# Altium schematic symbol library Schlib2.SchLib: 4 symbols
Pins are listed as number, name and electrical type; pins without a type are passive.

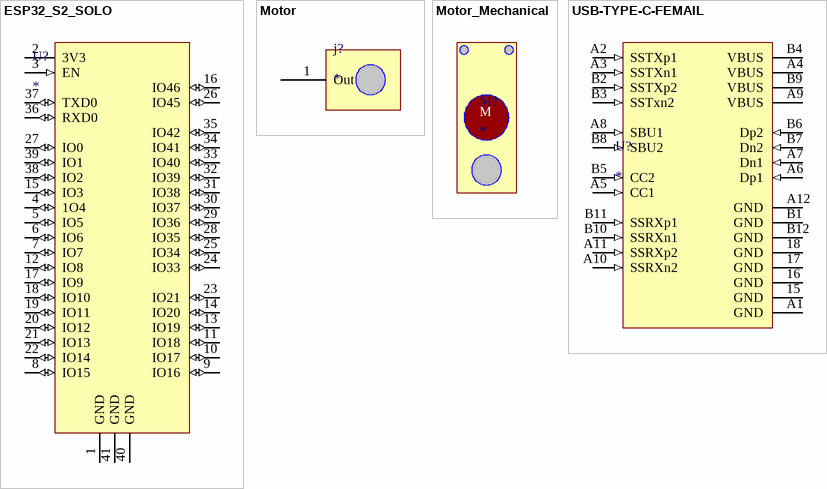
[diagram p0: symbols ESP32_S2_SOLO to USB-TYPE-C-FEMAIL]

## ESP32_S2_SOLO
designator U?
footprint ESP32_S2_SOLO
pins: 1 GND (power), 2 3V3 (power), 3 EN (in), 4 1O4 (io), 5 IO5 (io), 6 IO6 (io), 7 IO7 (io), 8 IO15 (io), 9 IO16 (io), 10 IO17 (io), 11 IO18 (io), 12 IO8 (io), 13 IO19 (io), 14 IO20 (io), 15 IO3 (io), 16 IO46 (io), 17 IO9 (io), 18 IO10 (io), 19 IO11 (io), 20 IO12 (io), 21 IO13 (io), 22 IO14 (io), 23 IO21 (io), 24 IO33 (io), 25 IO34 (io), 26 IO45 (io), 27 IO0 (io), 28 IO35 (io), 29 IO36 (io), 30 IO37 (io), 31 IO38 (io), 32 IO39 (io), 33 IO40 (io), 34 IO41 (io), 35 IO42 (io), 36 RXD0 (io), 37 TXD0 (io), 38 IO2 (io), 39 IO1 (io), 40 GND (power), 41 GND (power)

## Motor
designator j?
footprint Motor_pin
pins: 1 Out

## Motor_Mechanical
designator M?
footprint Motor_mechanical
text: M

## USB-TYPE-C-FEMAIL
designator U?
footprint C5156605 (USB-C-FMAIL)
pins: 15 GND (power), 16 GND (power), 17 GND (power), 18 GND (power), A1 GND (power), A2 SSTXp1 (in), A3 SSTXn1 (in), A4 VBUS (power), A5 CC1 (in), A6 Dp1 (in), A7 Dn1 (in), A8 SBU1 (in), A9 VBUS (power), A10 SSRXn2 (in), A11 SSRXp2 (in), A12 GND (power), B1 GND (power), B2 SSTXp2 (in), B3 SSTxn2 (in), B4 VBUS (power), B5 CC2 (in), B6 Dp2 (in), B7 Dn2 (in), B8 SBU2 (in), B9 VBUS (power), B10 SSRXn1 (in), B11 SSRXp1 (in), B12 GND (power)